# Altium footprint library Footprint.PcbLib: 411 footprints (part 4 of 26)
Each footprint in its own frame and in the unit in brackets; x right, y up, seen from the top. Pads: shape width x height; smd on the part's side, far side on the other; paste and mask are expansions set on the pad; w line width, h text height; cw(c..) or ccw(c..) is an arc to the next point about the centre after c.
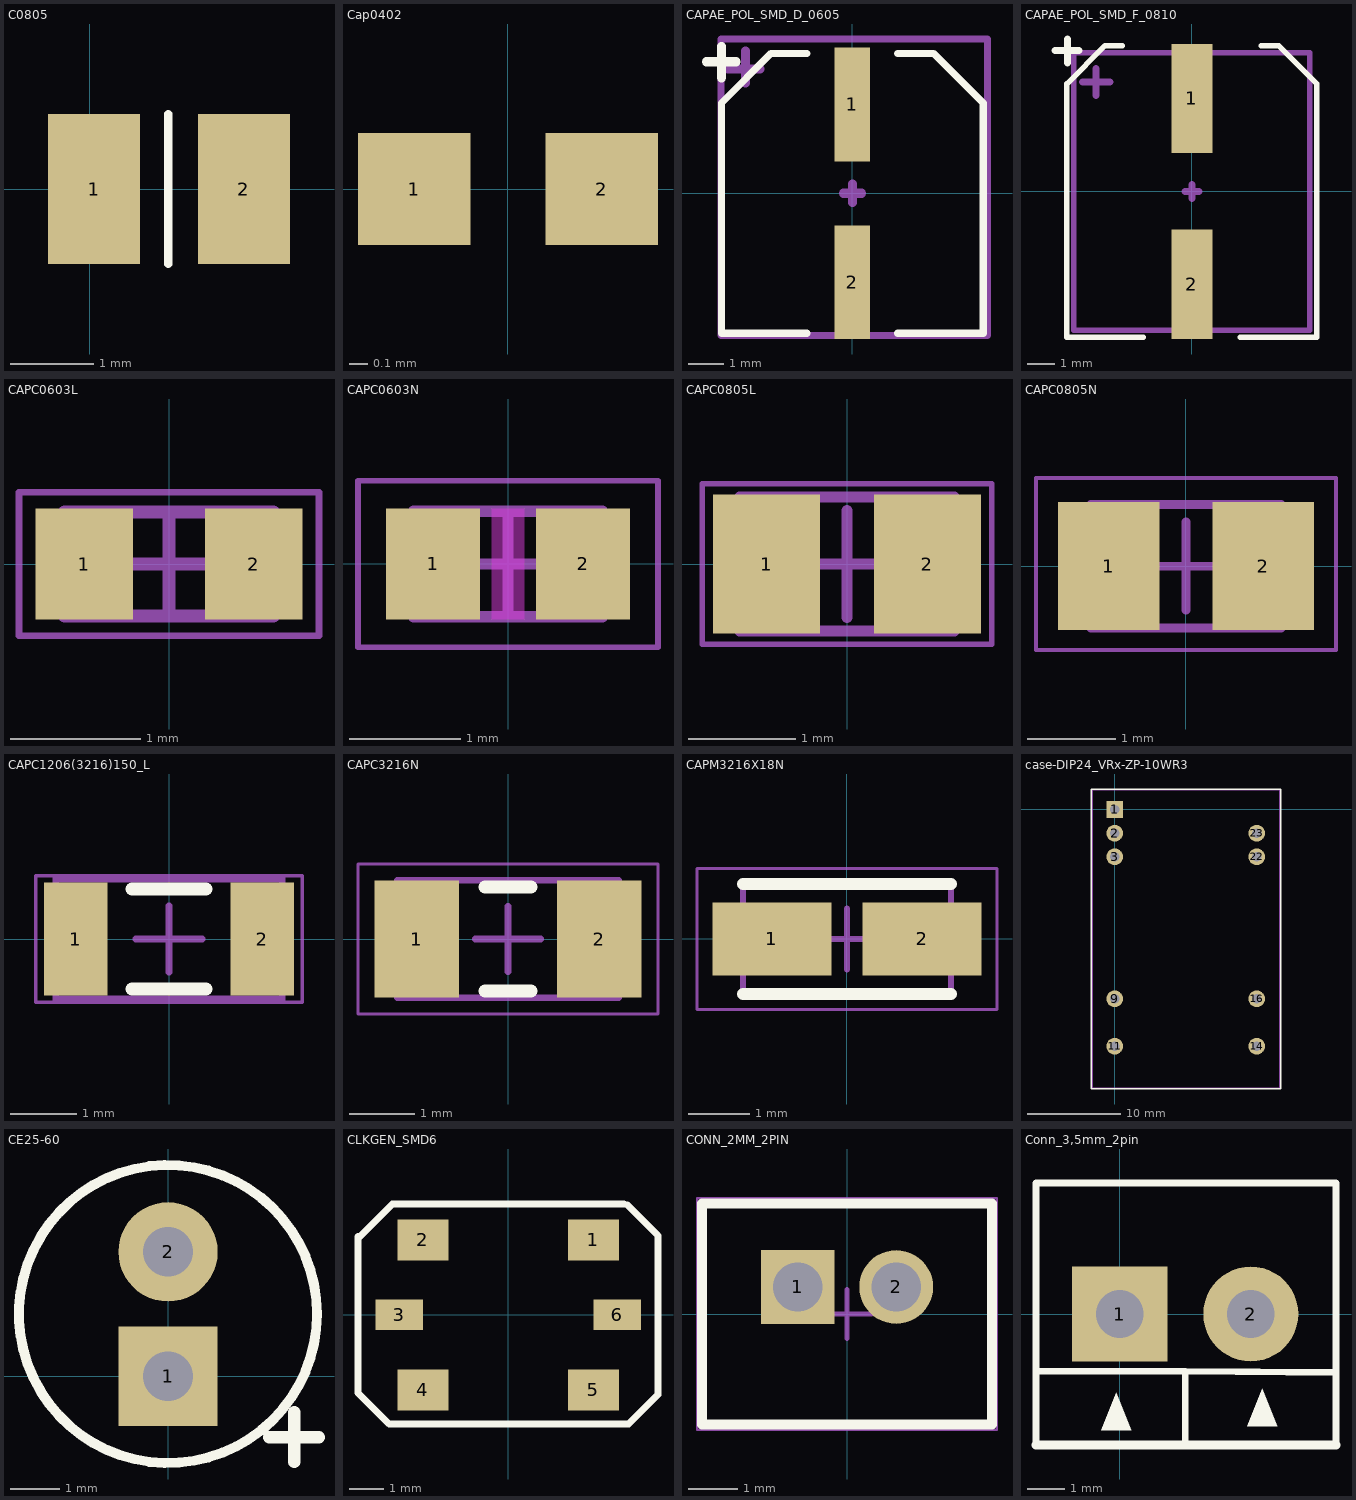
[diagram p3: the footprints below, top view; thin cyan lines are the x and y axes]

## C0805 [mm]
pads (2):
  rect 1.1x1.8 smd: 1(0.05,0) 2(1.85,0)
Top Overlay:
  lines w0.1: 0.94,-0.9 0.94,0.9

## Cap0402 [mm]
pads (2):
  rect 0.6x0.6 smd: 1(-0.5,0) 2(0.5,0)
3D body "User Library-SMD CAPACITOR.step": height 0.49, standoff -0.01, extent -0.5,-0.25 0.5,0.25

## CAPAE_POL_SMD_D_0605 [mm]
pads (2):
  rect 1x3.2 smd: 1(0,2.5) 2(0,-2.5)
Top Overlay:
  lines w0.2: -1.27,-3.937 -3.683,-3.937 -3.683,2.54 -2.286,3.937 -1.27,3.937 ; 1.27,-3.937 3.683,-3.937 3.683,2.54 2.286,3.937 1.27,3.937
  lines w0.254: -4.1,3.7 -3.275,3.7 ; -3.675,3.25 -3.675,4.125
Mechanical 15:
  lines w0.2: -3.7,-4 3.8,-4 3.8,4.34 -3.7,4.34 -3.7,-4
  lines w0.254: -3.5,3.5 -2.6,3.5 ; -3,3.1 -3,4 ; -0.254,0 0.254,0 ; 0,-0.254 0,0.254
  text ".Designator" at -3.5,4.6 h1.52
3D body "SW3dPS-capacitor size D.STEP": height 5.41, standoff -0.01, extent -3.298,-3.5 3.302,3.5

## CAPAE_POL_SMD_F_0810 [mm]
pads (2):
  rect 1.5x4 smd: 1(0,3.4) 2(0,-3.4)
Top Overlay:
  lines w0.2: -2.54,5.334 -3.175,5.334 -4.572,3.937 -4.572,-5.334 -1.778,-5.334 ; 1.778,-5.334 4.572,-5.334 4.572,3.937 3.175,5.334 2.54,5.334
  lines w0.254: -5,5.15 -4.125,5.15 ; -4.55,4.7 -4.55,5.575
Mechanical 15:
  lines w0.2: -4.318,-5.08 4.318,-5.08 4.318,5.08 -4.318,5.08 -4.318,-5.08
  lines w0.254: -4,4 -3,4 ; -3.5,3.5 -3.5,4.5 ; -0.254,0 0.254,0 ; 0,-0.254 0,0.254
  text ".Designator" at -4.3,5.5 h1.52
3D body "SW3dPS-capacitor size F.STEP": height 10.21, standoff -0.01, extent -4.15,-4.953 4.15,4.947

## CAPC0603L [mm]
height 0.9
pads (2):
  rect 0.75x0.85 smd: 1(-0.65,0) 2(0.65,0)
Mechanical 15:
  lines w0.05: -1.15,-0.55 -1.15,0.55 1.15,0.55 1.15,-0.55 -1.15,-0.55
  lines w0.1: -0.4,0 0.4,0 ; 0,-0.4 0,0.4 ; -0.8,-0.4 -0.8,0.4 0.8,0.4 0.8,-0.4 -0.8,-0.4
  text ".Designator" at -1.2,0.7 h1.52
3D body "CAPC0603.step": height 0.9, standoff 0, extent -0.8,-0.4 0.8,0.4

## CAPC0603N [mm] "Chip Capacitor, 2-Leads, Body 1,60x0,85mm, IPC Medium Density"
height 0.8
pads (2):
  rect 0.85x1 smd: 1(-0.675,0) 2(0.675,0)
Top Layer keep-out:
  rectangle: -0.15,-0.5 0.15,0.5
Mechanical 13:
  lines w0.1: -0.85,-0.475 -0.85,0.475 0.85,0.475 0.85,-0.475 -0.85,-0.475
Mechanical 15:
  lines w0.05: -1.35,-0.75 -1.35,0.75 1.35,0.75 1.35,-0.75 -1.35,-0.75
  lines w0.1: -0.475,0 0.475,0 ; 0,-0.475 0,0.475
  text ".Designator" at -1.4,0.9 h1.52
3D body: height 0.8, standoff 0, extent -0.55,-0.475 0.55,0.475
3D body: height 0.8, standoff 0, extent -0.85,-0.475 -0.55,0.475
3D body: height 0.8, standoff 0, extent 0.55,-0.475 0.85,0.475

## CAPC0805L [mm]
height 1.3
pads (2):
  rect 1x1.3 smd: 1(-0.75,0) 2(0.75,0)
Mechanical 13:
  lines w0.1: -1,-0.625 -1,0.625 1,0.625 1,-0.625 -1,-0.625
Mechanical 15:
  lines w0.05: -1.35,-0.75 -1.35,0.75 1.35,0.75 1.35,-0.75 -1.35,-0.75
  lines w0.1: -0.5,0 0.5,0 ; 0,-0.5 0,0.5
  text ".Designator" at -1.4,1 h1.52
3D body "CAPC0805.step": height 1.3, standoff 0, extent -1,-0.625 1,0.625

## CAPC0805N [mm] "Chip Capacitor, 2-Leads, Body 2,00x1,25mm, IPC Medium Density"
height 0.9
pads (2):
  rect 1.15x1.45 smd: 1(-0.875,0) 2(0.875,0)
Mechanical 13:
  lines w0.1: -1.075,-0.7 -1.075,0.7 1.075,0.7 1.075,-0.7 -1.075,-0.7
Mechanical 15:
  lines w0.05: -1.7,-0.95 -1.7,1 1.7,1 1.7,-0.95 -1.7,-0.95
  lines w0.1: -0.5,0 0.5,0 ; 0,-0.5 0,0.5
  text ".Designator" at -1.75,1.125 h1.52
3D body "CAPC0805N.step": height 0.9, standoff 0, extent -1.075,-0.7 1.075,0.7

## CAPC1206(3216)150_L [mm]
height 1.5
pads (2):
  rect 0.95x1.7 smd: 1(-1.4,0) 2(1.4,0)
Top Overlay:
  lines w0.2: -0.55,-0.75 0.55,-0.75 ; -0.55,0.75 0.55,0.75
Mechanical 13:
  lines w0.1: -1.7,-0.9 1.7,-0.9 1.7,0.9 -1.7,0.9 -1.7,-0.9
Mechanical 15:
  lines w0.05: -2,-0.95 2,-0.95 2,0.95 -2,0.95 -2,-0.95
  lines w0.1: -0.5,0 0.5,0 ; 0,-0.5 0,0.5
3D body: height 1.5, standoff 0, extent 1.2,-0.9 1.7,0.9
3D body: height 1.5, standoff 0, extent -1.7,-0.9 -1.2,0.9
3D body: height 1.5, standoff 0, extent -1.2,-0.9 1.2,0.9

## CAPC3216N [mm] "Chip Capacitor, 2-Leads, Body 3.20x1.60mm, IPC Medium Density"
height 1.4
pads (2):
  rect 1.3x1.8 smd: 1(-1.4,0) 2(1.4,0)
Top Overlay:
  lines w0.2: -0.35,-0.8 0.35,-0.8 ; -0.35,0.8 0.35,0.8
Mechanical 13:
  lines w0.1: -1.7,-0.9 1.7,-0.9 1.7,0.9 -1.7,0.9 -1.7,-0.9
Mechanical 15:
  lines w0.05: -2.3,-1.15 2.3,-1.15 2.3,1.15 -2.3,1.15 -2.3,-1.15
  lines w0.1: -0.5,0 0.5,0 ; 0,-0.5 0,0.5
  text ".Designator" at -2.3,1.3 h1.52
3D body "CAPC3216N.step": height 1.4, standoff 0, extent -1.7,-0.9 1.7,0.9

## CAPM3216X18N [mm] "Molded Capacitor, 2-Leads, Body 3,20x1,60mm, IPC Medium Density"
height 1.8
pads (2):
  rect 1.95x1.2 smd: 1(-1.225,0) 2(1.225,0)
Top Overlay:
  lines w0.2: -1.7,-0.9 1.7,-0.9 ; -1.7,0.9 1.7,0.9
Mechanical 13:
  lines w0.1: -1.7,-0.9 -1.7,0.9 1.7,0.9 1.7,-0.9 -1.7,-0.9
Mechanical 15:
  lines w0.05: -2.45,-1.15 -2.45,1.15 2.45,1.15 2.45,-1.15 -2.45,-1.15
  lines w0.1: -0.5,0 0.5,0 ; 0,-0.5 0,0.5
3D body: height 1.8, standoff 0, extent -1.7,-0.9 1.7,0.9

## case-DIP24_VRx-ZP-10WR3 [mm]
pads (9):
  rect 1.8x1.8 hole 1: 1(0,0)
  round 1.8 hole 1: 2(0,-2.54) 3(0,-5.08) 9(0,-20.32) 11(0,-25.4) 14(15.24,-25.4) 16(15.24,-20.32) 22(15.24,-5.08) 23(15.24,-2.54)
Top Overlay:
  lines w0.15: -2.5,-30 17.8,-30 17.8,2.2 -2.5,2.2 -2.5,-30
Mechanical 1:
  lines w0.15: -2.4,-29.9 17.7,-29.9 17.7,2.1 -2.4,2.1 -2.4,-29.9
3D body "VRA_ZP-10WR3.stp": height 10.81, standoff -3.79, extent -2.4,-29.9 17.65,2.1

## CE25-60 [mm]
pads (2):
  rect 2x2 hole 1: 1(0,0)
  round 2 hole 1: 2(0,2.5)
Top Overlay:
  circle w0.2: c0,1.25 r3
  lines w0.25: 2.04,-1.23 3.04,-1.23 ; 2.54,-1.73 2.54,-0.73

## CLKGEN_SMD6 [mm]
pads (6):
  rect 1.5x1.2 smd: 1(2.5,2.2) 2(-2.5,2.2) 4(-2.5,-2.2) 5(2.5,-2.2)
  rect 1.4x0.9 smd: 3(-3.2,0) 6(3.2,0)
Top Overlay:
  lines w0.2: -4.406,2.248 -3.925,2.729 -3.575,3.079 -3.4,3.254 -2.5,3.254 3.4,3.254 ; -4.406,2.3 -4.406,-2.288 -3.492,-3.202 3.537,-3.202 4.397,-2.342 4.397,2.324 3.488,3.234

## CONN_2MM_2PIN [mm] "Connector, 2-Leads, Pitch 2mm"
height 6
pads (2):
  rect 1.5x1.5 hole 1: 1(-1,0.55)
  round 1.5 hole 1: 2(1,0.55)
Top Overlay:
  lines w0.2: -2.95,-2.25 2.95,-2.25 2.95,2.25 -2.95,2.25 -2.95,-2.25
Mechanical 13:
  lines w0.1: -2.95,-2.25 -2.95,2.25 2.95,2.25 2.95,-2.25 -2.95,-2.25
Mechanical 15:
  lines w0.05: -3.05,-2.35 -3.05,2.35 3.05,2.35 3.05,-2.35 -3.05,-2.35
  lines w0.1: -0.5,0 0.5,0 ; 0,-0.5 0,0.5
3D body: height 0, standoff -3.4, extent -1.249,0.301 -0.751,0.799
3D body: height 0, standoff -3.4, extent 0.75,0.301 1.249,0.8
3D body "User Library-JST B2B-PH-K-S.STEP": height 6, standoff -3.4, extent -2.95,-2.286 2.95,2.214

## Conn_3,5mm_2pin [mm]
pads (2):
  rect 2.54x2.54 hole 1.27: 1(0,0)
  round 2.54 hole 1.27: 2(3.5,0)
Top Overlay:
  region: 0.3,-3.1 -0.5,-3.1 -0.1,-2.1
  region: 4.2,-3 3.4,-3 3.8,-2
  lines w0.178: -2.238,-3.5 -2.238,-2.014 -2.238,0.986 -2.238,3.5 0.92,3.5 5.776,3.5 5.776,-1.002 5.776,-3.5 ; -2.236,-1.527 1.748,-1.528 ; 1.75,-3.498 1.75,-1.528 5.765,-1.565
  lines w0.25: -2.238,-3.5 5.776,-3.5
3D body "User Library-DG350-3,5-02P.step": height 8.4, standoff -3.4, extent -2.2,-3.4 5.8,3.4